# Altium footprint library PcbLib1.PcbLib: 36 footprints (part 2 of 3)
Each footprint in its own frame and in the unit in brackets; x right, y up, seen from the top. Pads: shape width x height; smd on the part's side, far side on the other; paste and mask are expansions set on the pad; w line width, h text height; cw(c..) or ccw(c..) is an arc to the next point about the centre after c.
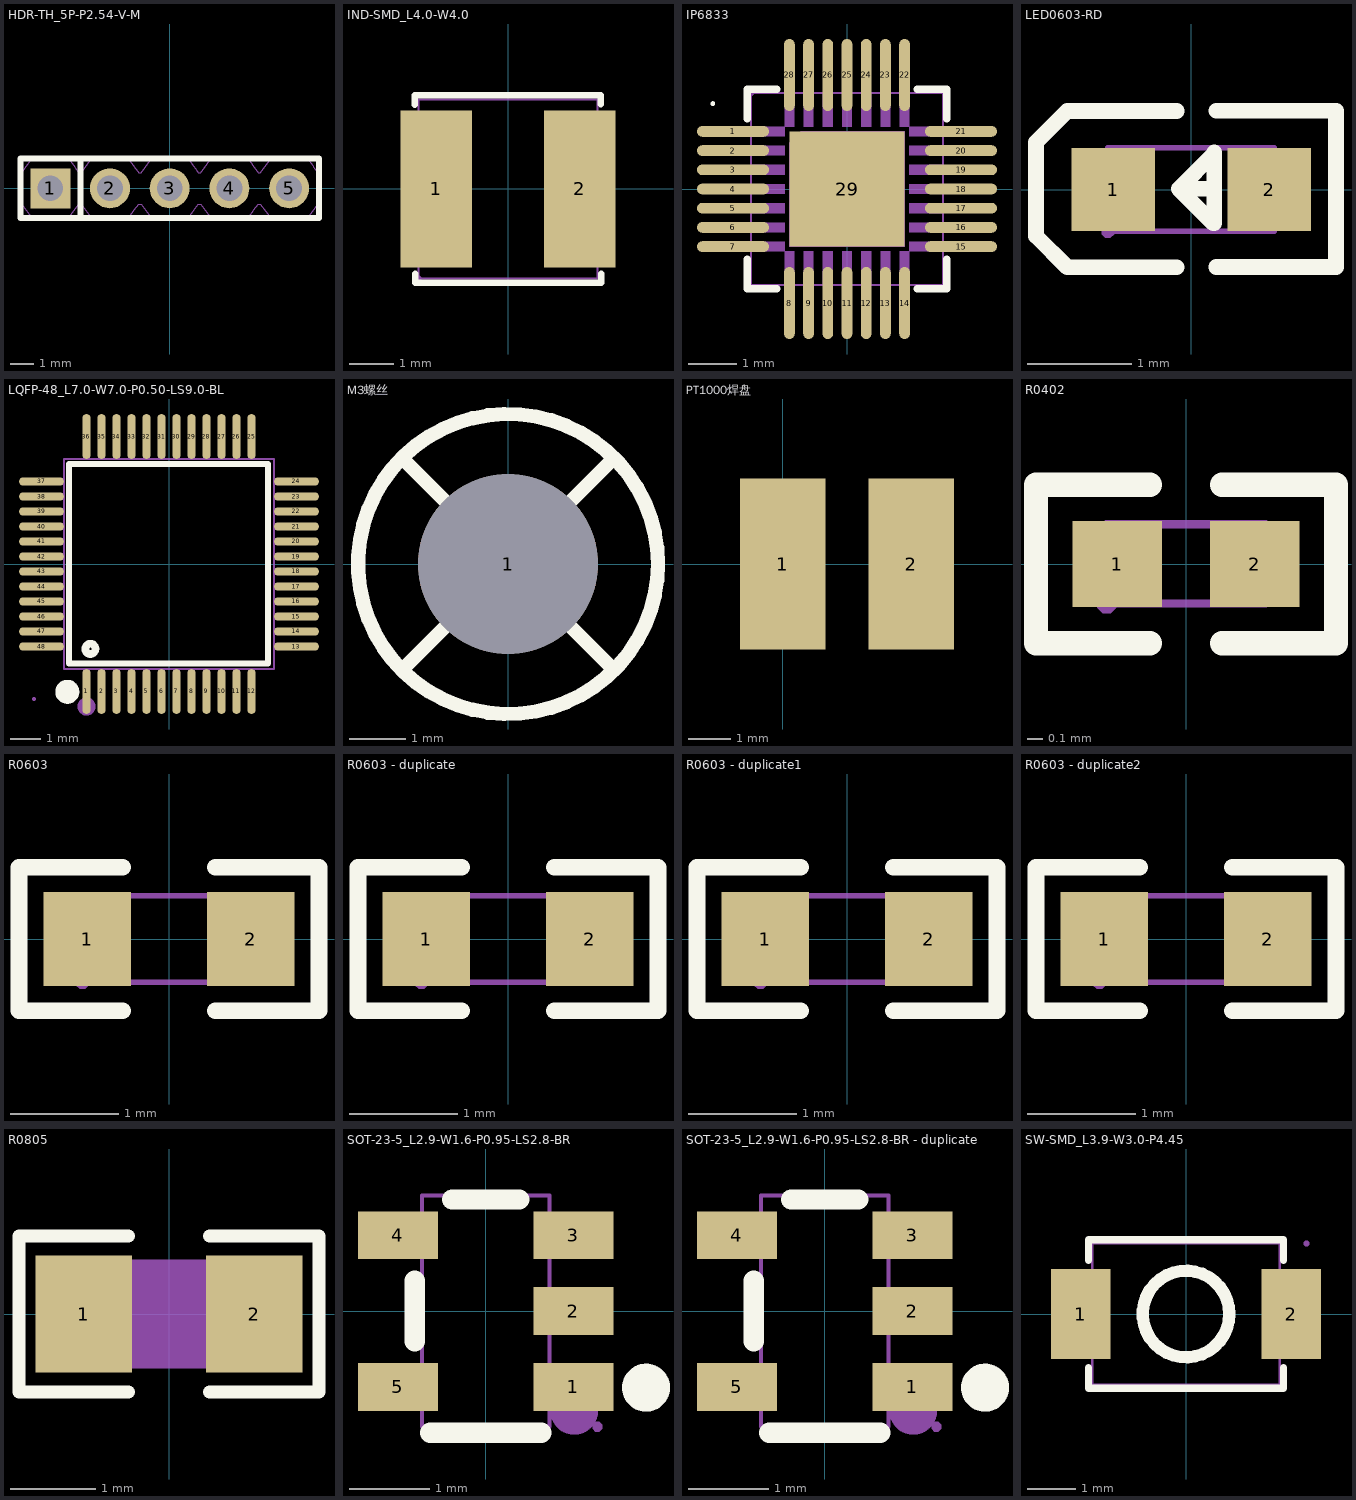
[diagram p1: the footprints below, top view; thin cyan lines are the x and y axes]

## HDR-TH_5P-P2.54-V-M [mm]
pads (5):
  rect 1.7x1.7 hole 1.1: 1(-5.08,0)
  round 1.7 hole 1.1: 2(-2.54,0) 3(0,0) 4(2.54,0) 5(5.08,0)
Top Overlay:
  lines w0.254: -3.786,-1.27 -3.786,1.27 ; -6.35,-1.27 -6.35,1.27 6.35,1.27 6.35,-1.27 -6.35,-1.27
Mechanical 6:
  lines w0.051: -6.35,-0.67 -6.35,-0.67 -6.3,-0.67 -5.85,-1.27 -4.31,-1.27 -4.077,-0.965 -3.86,-0.67 -3.76,-0.67 -3.31,-1.27 -1.77,-1.27 -1.542,-0.972 -1.503,-0.919 -1.32,-0.67 -1.22,-0.67 -0.77,-1.27 0.77,-1.27 0.992,-0.98 1.02,-0.942 1.22,-0.67 1.32,-0.67 1.77,-1.27 3.31,-1.271 3.51,-1.009 3.545,-0.963 3.581,-0.913 3.759,-0.67 3.86,-0.67 4.31,-1.27 5.85,-1.27 6.075,-0.976 6.3,-0.67 6.35,-0.67 6.35,0.67 6.3,0.67 6.112,0.925 6.079,0.97 5.85,1.27 4.311,1.27 3.86,0.67 3.76,0.67 3.533,0.979 3.458,1.076 3.31,1.27 1.77,1.27 1.32,0.67 1.22,0.67 1.136,0.783 1.108,0.822 1.01,0.955 0.867,1.143 0.77,1.27 -0.77,1.27 -1.22,0.67 -1.32,0.67 -1.417,0.801 -1.436,0.827 -1.459,0.859 -1.546,0.976 -1.631,1.088 -1.77,1.27 -3.31,1.27 -3.76,0.67 -3.86,0.67 -4.017,0.884 -4.048,0.925 -4.149,1.059 -4.31,1.27 -5.85,1.27 -6.028,1.032 -6.299,0.67 -6.35,0.67 -6.35,-0.67 ; -6.35,-0.67 -6.35,-0.67
Mechanical 8:
  region: -6.29,-1.271 -6.29,-1.296 -6.325,-1.331 -6.375,-1.331 -6.41,-1.296 -6.41,-1.271 -6.41,-1.246 -6.375,-1.211 -6.325,-1.211 -6.29,-1.246 -6.29,-1.271
Mechanical 9:
  region: -5.4,0.32 -4.76,0.32 -4.76,-0.32 -5.4,-0.32
  region: -2.86,0.32 -2.22,0.32 -2.22,-0.32 -2.86,-0.32
  region: -0.32,0.32 0.32,0.32 0.32,-0.32 -0.32,-0.32
  region: 2.22,0.32 2.86,0.32 2.86,-0.32 2.22,-0.32
  region: 4.76,0.32 5.4,0.32 5.4,-0.32 4.76,-0.32

## IND-SMD_L4.0-W4.0 [mm]
pads (2):
  rect 1.6x3.5 smd: 1(-1.6,0) 2(1.6,0)
Top Overlay:
  lines w0.15: -2.08,1.88 -2.083,2.095 2.07,2.095 2.07,1.9 ; -2.07,-1.89 -2.07,-2.096 2.082,-2.096 2.08,-1.9
Mechanical 6:
  lines w0.051: -2,-2 2,-2 2,2 -2,2 -2,-2
Mechanical 8:
  region: -1.94,-2 -1.94,-2.025 -1.975,-2.06 -2.025,-2.06 -2.06,-2.025 -2.06,-2 -2.06,-1.975 -2.025,-1.94 -1.975,-1.94 -1.94,-1.975 -1.94,-2
Mechanical 9:
  region: -2,1.65 -1.05,1.65 -1.05,-1.65 -2,-1.65
  region: 1.05,1.65 2,1.65 2,-1.65 1.05,-1.65

## IP6833 [mil]
pads (29):
  oval 59x8.82 smd paste+0 mask+2: 1(-93.49,47.24) 2(-93.5,31.5) 3(-93.5,15.75) 4(-93.5,0) 5(-93.5,-15.75) 6(-93.5,-31.5) 7(-93.5,-47.24)
  oval 8.82x59 smd paste+0 mask+2: 8(-47.24,-93.5)
  oval 8.82x59 smd paste-99999 mask+2: 9(-31.5,-93.5) 10(-15.75,-93.5) 11(0,-93.5) 12(15.75,-93.5) 13(31.5,-93.5) 14(47.24,-93.5) 22(47.24,93.5) 23(31.5,93.5) 24(15.75,93.5) 25(0,93.5) 26(-15.75,93.5) 27(-31.5,93.5) 28(-47.24,93.5)
  oval 59x8.82 smd paste-99999 mask+2: 15(93.5,-47.24) 16(93.5,-31.5) 17(93.5,-15.75) 18(93.5,0) 19(93.5,15.75) 20(93.5,31.5) 21(93.49,47.24)
  rect 94.49x94.49 smd paste-99999 mask+2: 29(0,0)
Top Overlay:
  circle w1.97: c-110,70 r0.98
  lines w6: -81.74,-57.65 -81.74,-81.74 -57.65,-81.74 ; -81.74,57.65 -81.74,81.74 -57.65,81.74 ; 57.65,-81.74 81.74,-81.74 81.74,-57.65 ; 57.65,81.74 81.74,81.74 81.74,57.65
Mechanical 6:
  circle w1.97: c-105.15,47.24 r0.98
Mechanical 7:
  lines w2: -78.74,-78.74 78.74,-78.74 78.74,78.74 -78.74,78.74 -78.74,-78.74
Mechanical 8:
  region: -76.38,78.74 -76.38,77.76 -77.76,76.38 -79.72,76.38 -81.1,77.76 -81.1,78.74 -81.1,79.72 -79.72,81.1 -77.76,81.1 -76.38,79.72 -76.38,78.74
Mechanical 9:
  region: -78.74,43.31 -51.18,43.31 -51.18,51.18 -78.74,51.18
  region: -78.74,27.56 -51.18,27.56 -51.18,35.43 -78.74,35.43
  region: -78.74,11.81 -51.18,11.81 -51.18,19.68 -78.74,19.68
  region: -78.74,-3.94 -51.18,-3.94 -51.18,3.94 -78.74,3.94
  region: -78.74,-19.68 -51.18,-19.68 -51.18,-11.81 -78.74,-11.81
  region: -78.74,-35.43 -51.18,-35.43 -51.18,-27.56 -78.74,-27.56
  region: -78.74,-51.18 -51.18,-51.18 -51.18,-43.31 -78.74,-43.31
  region: -51.18,-78.74 -43.31,-78.74 -43.31,-51.18 -51.18,-51.18
  region: -35.43,-78.74 -27.56,-78.74 -27.56,-51.18 -35.43,-51.18
  region: -19.68,-78.74 -11.81,-78.74 -11.81,-51.18 -19.68,-51.18
  region: -3.94,-78.74 3.94,-78.74 3.94,-51.18 -3.94,-51.18
  region: 11.81,-78.74 19.68,-78.74 19.68,-51.18 11.81,-51.18
  region: 27.56,-78.74 35.43,-78.74 35.43,-51.18 27.56,-51.18
  region: 43.31,-78.74 51.18,-78.74 51.18,-51.18 43.31,-51.18
  region: 78.74,-51.18 51.18,-51.18 51.18,-43.31 78.74,-43.31
  region: 78.74,-35.43 51.18,-35.43 51.18,-27.56 78.74,-27.56
  region: 78.74,-19.68 51.18,-19.68 51.18,-11.81 78.74,-11.81
  region: 78.74,-3.94 51.18,-3.94 51.18,3.94 78.74,3.94
  region: 78.74,11.81 51.18,11.81 51.18,19.68 78.74,19.68
  region: 78.74,27.56 51.18,27.56 51.18,35.43 78.74,35.43
  region: 78.74,43.31 51.18,43.31 51.18,51.18 78.74,51.18
  region: 43.31,78.74 51.18,78.74 51.18,51.18 43.31,51.18
  region: 27.56,78.74 35.43,78.74 35.43,51.18 27.56,51.18
  region: 11.81,78.74 19.68,78.74 19.68,51.18 11.81,51.18
  region: -3.94,78.74 3.94,78.74 3.94,51.18 -3.94,51.18
  region: -19.68,78.74 -11.81,78.74 -11.81,51.18 -19.68,51.18
  region: -35.43,78.74 -27.56,78.74 -27.56,51.18 -35.43,51.18
  region: -51.18,78.74 -43.31,78.74 -43.31,51.18 -51.18,51.18
  region: -37.8,47.24 47.24,47.24 47.24,-47.24 -47.24,-47.24 -47.24,37.8

## LED0603-RD [mm]
pads (2):
  rect 0.8x0.8 smd: 1(-0.749,0) 2(0.749,0)
Top Overlay:
  lines w0.15: -0.14,-0.746 -1.19,-0.746 -1.49,-0.446 -1.49,-0.346 -1.49,0.354 -1.49,0.454 -1.19,0.754 -0.14,0.754 ; 0.22,0.007 -0.12,0.007 ; 0.24,-0.744 1.39,-0.744 ; 0.24,0.757 1.39,0.757 1.39,-0.723 ; -0.12,0.007 0.22,0.347 0.22,0.357 0.22,-0.324 0.21,-0.324 -0.12,0.007
Mechanical 2:
  region: 0.529,0.068 1.069,0.068 1.069,-0.062 0.529,-0.062
  region: 0.735,-0.267 0.735,0.273 0.865,0.273 0.865,-0.267
  region: -1.07,0.062 -0.53,0.062 -0.53,-0.068 -1.07,-0.068
Mechanical 6:
  lines w0.051: -0.8,-0.4 0.8,-0.4 0.8,0.4 -0.8,0.4 -0.8,-0.4
Mechanical 8:
  region: -0.739,-0.403 -0.739,-0.428 -0.775,-0.463 -0.824,-0.463 -0.859,-0.428 -0.859,-0.403 -0.859,-0.379 -0.824,-0.344 -0.775,-0.344 -0.739,-0.379 -0.739,-0.403
Mechanical 9:
  region: 0.5,-0.396 0.5,0.404 0.8,0.404 0.8,-0.396
  region: -0.8,-0.403 -0.8,0.397 -0.5,0.397 -0.5,-0.403

## LQFP-48_L7.0-W7.0-P0.50-LS9.0-BL [mm]
pads (48):
  oval 0.27x1.5 smd paste+0 mask+0.05: 1(-2.75,-4.25) 2(-2.25,-4.25) 3(-1.75,-4.25) 4(-1.25,-4.25) 5(-0.75,-4.25) 6(-0.25,-4.25) 7(0.25,-4.25) 8(0.75,-4.25) 9(1.25,-4.25) 10(1.75,-4.25) 11(2.25,-4.25) 12(2.75,-4.25) 25(2.75,4.25) 26(2.25,4.25) 27(1.75,4.25) 28(1.25,4.25) 29(0.75,4.25) 30(0.25,4.25) 31(-0.25,4.25) 32(-0.75,4.25) 33(-1.25,4.25) 34(-1.75,4.25) 35(-2.25,4.25) 36(-2.75,4.25)
  oval 1.5x0.27 smd paste+0 mask+0.05: 13(4.25,-2.75) 14(4.25,-2.25) 15(4.25,-1.75) 16(4.25,-1.25) 17(4.25,-0.75) 18(4.25,-0.25) 19(4.25,0.25) 20(4.25,0.75) 21(4.25,1.25) 22(4.25,1.75) 23(4.25,2.25) 24(4.25,2.75) 37(-4.25,2.75) 38(-4.25,2.25) 39(-4.25,1.75) 40(-4.25,1.25) 41(-4.25,0.75) 42(-4.25,0.25) 43(-4.25,-0.25) 44(-4.25,-0.75) 45(-4.25,-1.25) 46(-4.25,-1.75) 47(-4.25,-2.25) 48(-4.25,-2.75)
Top Overlay:
  circle w0.254: c-2.62,-2.83 r0.17
  lines w0.2: -2.896,3.34 3.302,3.34 3.302,-3.315 -3.327,-3.315 -3.327,3.34 -2.565,3.34
  lines w0.4: -3.39,-4.06 ccw(c-3.389,-4.26) -3.387,-4.06
Mechanical 2:
  circle w0.3: c-2.75,-4.75 r0.15
Mechanical 6:
  lines w0.051: -3.5,-3.5 -3.5,3.5 3.5,3.5 3.5,-3.5 -3.5,-3.5
Mechanical 7:
  drawing of 48 lines, arcs and shapes, not listed
Mechanical 8:
  region: -4.44,-4.5 -4.44,-4.525 -4.475,-4.56 -4.525,-4.56 -4.56,-4.525 -4.56,-4.5 -4.56,-4.475 -4.525,-4.44 -4.475,-4.44 -4.44,-4.475 -4.44,-4.5
Mechanical 9:
  drawing of 48 lines, arcs and shapes, not listed

## M3螺丝 [mil]
pads (1):
  round 126 hole 126 paste-99999 mask+4: 1(0,0)
Top Overlay:
  circle w10: c0,0 r105
  lines w10: -72.5,-72.5 72.5,72.5 ; -72.5,72.5 72.5,-72.5

## PT1000焊盘 [mm]
pads (2):
  rect 2x4 smd: 1(0,0) 2(3,0)

## R0402 [mm]
pads (2):
  rect 0.566x0.54 smd paste-100 mask+0.051: 1(-0.433,0) 2(0.433,0)
Top Overlay:
  lines w0.152: -0.226,-0.499 -0.944,-0.499 -0.944,0.499 -0.226,0.499 ; 0.226,-0.499 0.944,-0.499 0.944,0.499 0.226,0.499
Top Paste:
  region: -0.135,-0.23 -0.135,0.23 -0.175,0.27 -0.676,0.27 -0.716,0.23 -0.716,-0.23 -0.676,-0.27 -0.175,-0.27
  region: 0.135,-0.23 0.135,0.23 0.175,0.27 0.676,0.27 0.716,0.23 0.716,-0.23 0.676,-0.27 0.175,-0.27
Mechanical 6:
  lines w0.051: -0.5,-0.25 0.5,-0.25 0.5,0.25 -0.5,0.25 -0.5,-0.25
Mechanical 8:
  region: -0.44,-0.25 -0.44,-0.275 -0.475,-0.31 -0.525,-0.31 -0.56,-0.275 -0.56,-0.25 -0.56,-0.225 -0.525,-0.19 -0.475,-0.19 -0.44,-0.225 -0.44,-0.25
Mechanical 9:
  region: -0.249,0.25 -0.249,-0.25 -0.499,-0.25 -0.499,0.25
  region: 0.251,-0.25 0.251,0.25 0.501,0.25 0.501,-0.25

## R0603 [mm]
pads (2):
  rect 0.806x0.864 smd paste-100 mask+0.051: 1(-0.753,0) 2(0.753,0)
Top Overlay:
  lines w0.152: -0.426,-0.661 -1.385,-0.661 -1.385,0.661 -0.426,0.661 ; 0.426,-0.661 1.385,-0.661 1.385,0.661 0.426,0.661
Top Paste:
  region: 1.195,0.45 0.395,0.45 0.345,0.4 0.345,0.172 0.715,0.172 0.715,-0.158 0.345,-0.158 0.345,-0.4 0.395,-0.45 1.195,-0.45 1.245,-0.4 1.245,0.4
  region: -1.195,-0.45 -0.395,-0.45 -0.345,-0.4 -0.345,-0.172 -0.715,-0.172 -0.715,0.158 -0.345,0.158 -0.345,0.4 -0.395,0.45 -1.195,0.45 -1.245,0.4 -1.245,-0.4
Mechanical 6:
  lines w0.051: -0.8,-0.4 -0.8,0.4 0.8,0.4 0.8,-0.4 -0.8,-0.4
Mechanical 8:
  region: -0.74,-0.4 -0.74,-0.425 -0.775,-0.46 -0.825,-0.46 -0.86,-0.425 -0.86,-0.4 -0.86,-0.375 -0.825,-0.34 -0.775,-0.34 -0.74,-0.375 -0.74,-0.4
Mechanical 9:
  region: -0.8,-0.4 -0.8,0.4 -0.5,0.4 -0.5,-0.4
  region: 0.8,-0.4 0.8,0.4 0.5,0.4 0.5,-0.4

## R0603 - duplicate [mm]
pads (2):
  rect 0.806x0.864 smd paste-100 mask+0.051: 1(-0.753,0) 2(0.753,0)
Top Overlay:
  lines w0.152: -0.426,-0.661 -1.385,-0.661 -1.385,0.661 -0.426,0.661 ; 0.426,-0.661 1.385,-0.661 1.385,0.661 0.426,0.661
Top Paste:
  region: 1.195,0.45 0.395,0.45 0.345,0.4 0.345,0.172 0.715,0.172 0.715,-0.158 0.345,-0.158 0.345,-0.4 0.395,-0.45 1.195,-0.45 1.245,-0.4 1.245,0.4
  region: -1.195,-0.45 -0.395,-0.45 -0.345,-0.4 -0.345,-0.172 -0.715,-0.172 -0.715,0.158 -0.345,0.158 -0.345,0.4 -0.395,0.45 -1.195,0.45 -1.245,0.4 -1.245,-0.4
Mechanical 6:
  lines w0.051: -0.8,-0.4 -0.8,0.4 0.8,0.4 0.8,-0.4 -0.8,-0.4
Mechanical 8:
  region: -0.74,-0.4 -0.74,-0.425 -0.775,-0.46 -0.825,-0.46 -0.86,-0.425 -0.86,-0.4 -0.86,-0.375 -0.825,-0.34 -0.775,-0.34 -0.74,-0.375 -0.74,-0.4
Mechanical 9:
  region: -0.8,-0.4 -0.8,0.4 -0.5,0.4 -0.5,-0.4
  region: 0.8,-0.4 0.8,0.4 0.5,0.4 0.5,-0.4

## R0603 - duplicate1 [mm]
pads (2):
  rect 0.806x0.864 smd paste-100 mask+0.051: 1(-0.753,0) 2(0.753,0)
Top Overlay:
  lines w0.152: -0.426,-0.661 -1.385,-0.661 -1.385,0.661 -0.426,0.661 ; 0.426,-0.661 1.385,-0.661 1.385,0.661 0.426,0.661
Top Paste:
  region: -1.195,-0.45 -0.395,-0.45 -0.345,-0.4 -0.345,-0.172 -0.715,-0.172 -0.715,0.158 -0.345,0.158 -0.345,0.4 -0.395,0.45 -1.195,0.45 -1.245,0.4 -1.245,-0.4
  region: 1.195,0.45 0.395,0.45 0.345,0.4 0.345,0.172 0.715,0.172 0.715,-0.158 0.345,-0.158 0.345,-0.4 0.395,-0.45 1.195,-0.45 1.245,-0.4 1.245,0.4
Mechanical 6:
  lines w0.051: -0.8,-0.4 0.8,-0.4 0.8,0.4 -0.8,0.4 -0.8,-0.4
Mechanical 8:
  region: -0.74,-0.4 -0.74,-0.425 -0.775,-0.46 -0.825,-0.46 -0.86,-0.425 -0.86,-0.4 -0.86,-0.375 -0.825,-0.34 -0.775,-0.34 -0.74,-0.375 -0.74,-0.4
Mechanical 9:
  region: 0.8,-0.4 0.8,0.4 0.5,0.4 0.5,-0.4
  region: -0.8,-0.4 -0.8,0.4 -0.5,0.4 -0.5,-0.4

## R0603 - duplicate2 [mm]
pads (2):
  rect 0.806x0.864 smd paste-100 mask+0.051: 1(-0.753,0) 2(0.753,0)
Top Overlay:
  lines w0.152: -0.426,-0.661 -1.385,-0.661 -1.385,0.661 -0.426,0.661 ; 0.426,-0.661 1.385,-0.661 1.385,0.661 0.426,0.661
Top Paste:
  region: 1.195,0.45 0.395,0.45 0.345,0.4 0.345,0.172 0.715,0.172 0.715,-0.158 0.345,-0.158 0.345,-0.4 0.395,-0.45 1.195,-0.45 1.245,-0.4 1.245,0.4
  region: -1.195,-0.45 -0.395,-0.45 -0.345,-0.4 -0.345,-0.172 -0.715,-0.172 -0.715,0.158 -0.345,0.158 -0.345,0.4 -0.395,0.45 -1.195,0.45 -1.245,0.4 -1.245,-0.4
Mechanical 6:
  lines w0.051: -0.8,-0.4 -0.8,0.4 0.8,0.4 0.8,-0.4 -0.8,-0.4
Mechanical 8:
  region: -0.74,-0.4 -0.74,-0.425 -0.775,-0.46 -0.825,-0.46 -0.86,-0.425 -0.86,-0.4 -0.86,-0.375 -0.825,-0.34 -0.775,-0.34 -0.74,-0.375 -0.74,-0.4
Mechanical 9:
  region: -0.8,-0.4 -0.8,0.4 -0.5,0.4 -0.5,-0.4
  region: 0.8,-0.4 0.8,0.4 0.5,0.4 0.5,-0.4

## R0805 [mm]
pads (2):
  rect 1.133x1.377 smd paste-100 mask+0.051: 1(-1,0) 2(1,0)
Top Overlay:
  lines w0.152: -0.476,-0.917 -1.761,-0.917 -1.761,0.917 -0.476,0.917 ; 0.476,-0.917 1.761,-0.917 1.761,0.917 0.476,0.917
Top Paste:
  region: -1.7,-0.64 -1.7,0.64 -1.65,0.69 -0.5,0.69 -0.45,0.64 -0.445,0.23 -0.895,0.23 -0.895,-0.22 -0.455,-0.22 -0.45,-0.64 -0.5,-0.69 -1.65,-0.69
  region: 0.45,-0.64 0.45,-0.22 0.895,-0.22 0.895,0.23 0.455,0.23 0.45,0.64 0.5,0.69 1.65,0.69 1.7,0.64 1.7,-0.64 1.65,-0.69 0.5,-0.69
Mechanical 9:
  region: -1,-0.637 -1,0.637 1,0.637 1,-0.637
Mechanical 11:
  region: -0.97,-0.638 -0.97,-0.65 -0.988,-0.668 -1.012,-0.668 -1.03,-0.65 -1.03,-0.638 -1.03,-0.625 -1.012,-0.608 -0.988,-0.608 -0.97,-0.625 -0.97,-0.638
Mechanical 12:
  region: -1,-0.637 -1,0.637 -0.6,0.637 -0.6,-0.637
  region: 1,-0.637 1,0.637 0.6,0.637 0.6,-0.637

## SOT-23-5_L2.9-W1.6-P0.95-LS2.8-BR [mm]
pads (5):
  rect 1x0.6 smd paste+0 mask+0.05: 1(1.1,-0.95) 2(1.1,0) 3(1.1,0.95) 4(-1.1,0.95) 5(-1.1,-0.95)
Top Overlay:
  circle w0.3: c2.01,-0.96 r0.15
  lines w0.254: -0.889,-0.381 -0.889,0.381 ; -0.699,-1.524 0.698,-1.524 ; -0.422,1.397 0.422,1.397
Mechanical 2:
  circle w0.3: c1.11,-1.25 r0.15
Mechanical 6:
  lines w0.051: -0.8,-1.45 0.8,-1.45 0.8,1.45 -0.8,1.45 -0.8,-1.45
Mechanical 7:
  region: -0.79,-1.15 -0.96,-1.15 -0.96,-0.75 -0.79,-0.75
  region: -0.79,0.75 -0.96,0.75 -0.96,1.15 -0.79,1.15
  region: 0.96,-1.15 0.79,-1.15 0.79,-0.75 0.96,-0.75
  region: 0.96,0.75 0.79,0.75 0.79,1.15 0.96,1.15
  region: 0.96,-0.2 0.79,-0.2 0.79,0.2 0.96,0.2
Mechanical 8:
  region: 1.46,-1.45 1.46,-1.475 1.425,-1.51 1.375,-1.51 1.34,-1.475 1.34,-1.45 1.34,-1.425 1.375,-1.39 1.425,-1.39 1.46,-1.425 1.46,-1.45
Mechanical 9:
  region: -0.95,-1.15 -1.4,-1.15 -1.4,-0.75 -0.95,-0.75
  region: -0.95,0.75 -1.4,0.75 -1.4,1.15 -0.95,1.15
  region: 1.4,-1.15 0.95,-1.15 0.95,-0.75 1.4,-0.75
  region: 1.4,0.75 0.95,0.75 0.95,1.15 1.4,1.15
  region: 1.4,-0.2 0.95,-0.2 0.95,0.2 1.4,0.2

## SOT-23-5_L2.9-W1.6-P0.95-LS2.8-BR - duplicate [mm]
pads (5):
  rect 1x0.6 smd paste+0 mask+0.05: 1(1.1,-0.95) 2(1.1,0) 3(1.1,0.95) 4(-1.1,0.95) 5(-1.1,-0.95)
Top Overlay:
  circle w0.3: c2.01,-0.96 r0.15
  lines w0.254: -0.889,-0.381 -0.889,0.381 ; -0.699,-1.524 0.698,-1.524 ; -0.422,1.397 0.422,1.397
Mechanical 2:
  circle w0.3: c1.11,-1.25 r0.15
Mechanical 6:
  lines w0.051: -0.8,-1.45 0.8,-1.45 0.8,1.45 -0.8,1.45 -0.8,-1.45
Mechanical 7:
  region: -0.79,-1.15 -0.96,-1.15 -0.96,-0.75 -0.79,-0.75
  region: -0.79,0.75 -0.96,0.75 -0.96,1.15 -0.79,1.15
  region: 0.96,-1.15 0.79,-1.15 0.79,-0.75 0.96,-0.75
  region: 0.96,0.75 0.79,0.75 0.79,1.15 0.96,1.15
  region: 0.96,-0.2 0.79,-0.2 0.79,0.2 0.96,0.2
Mechanical 8:
  region: 1.46,-1.45 1.46,-1.475 1.425,-1.51 1.375,-1.51 1.34,-1.475 1.34,-1.45 1.34,-1.425 1.375,-1.39 1.425,-1.39 1.46,-1.425 1.46,-1.45
Mechanical 9:
  region: -0.95,-1.15 -1.4,-1.15 -1.4,-0.75 -0.95,-0.75
  region: -0.95,0.75 -1.4,0.75 -1.4,1.15 -0.95,1.15
  region: 1.4,-1.15 0.95,-1.15 0.95,-0.75 1.4,-0.75
  region: 1.4,0.75 0.95,0.75 0.95,1.15 1.4,1.15
  region: 1.4,-0.2 0.95,-0.2 0.95,0.2 1.4,0.2

## SW-SMD_L3.9-W3.0-P4.45 [mm]
pads (2):
  rect 1.23x1.86 smd: 1(-2.185,0) 2(2.185,0)
Top Overlay:
  circle w0.254: c0,0 r0.9
  lines w0.152: -2.026,-1.11 -2.026,-1.541 2.026,-1.541 2.026,-1.11 ; -2.026,1.11 -2.026,1.541 2.026,1.541 2.026,1.11
Mechanical 6:
  lines w0.051: -1.95,-1.465 1.95,-1.465 1.95,1.465 -1.95,1.465 -1.95,-1.465
Mechanical 8:
  region: 2.56,1.465 2.56,1.44 2.525,1.405 2.475,1.405 2.44,1.44 2.44,1.465 2.44,1.49 2.475,1.525 2.525,1.525 2.56,1.49 2.56,1.465
Mechanical 9:
  region: 2.5,0.65 2.5,-0.65 1.6,-0.65 1.6,0.65
  region: -2.5,0.65 -2.5,-0.65 -1.6,-0.65 -1.6,0.65